# Altium schematic symbol library LM5148QRGYRQ1.SchLib: 1 symbol
Pins are listed as number, name and electrical type; pins without a type are passive.

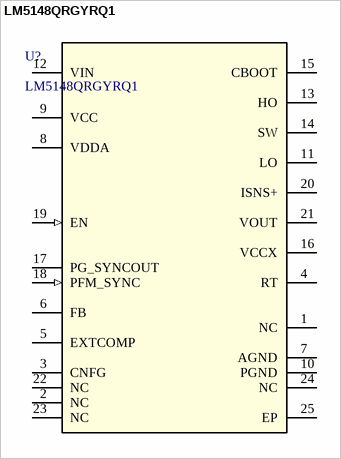
[diagram p0: symbol LM5148QRGYRQ1]

## LM5148QRGYRQ1
designator U?
Automotive, 80V synchronous buck DC/DC controller with ultra-low I<sub>Q</sub> 24-VQFN -40 to 125; Manufacturer_Name: Texas Instruments; TYPE: TYPE; RefDes: RefDes; Copyright: Copyright (C) 2025 Ultra Librarian. All rights reserved.; Manufacturer_Part_Number: LM5148QRGYRQ1
footprint RGY0024E-MFG
pins: 1 NC, 2 NC, 3 CNFG, 4 RT, 5 EXTCOMP, 6 FB, 7 AGND (power), 8 VDDA, 9 VCC (power), 10 PGND (power), 11 LO, 12 VIN (power), 13 HO, 14 SW (power), 15 CBOOT (power), 16 VCCX (power), 17 PG_SYNCOUT (oc), 18 PFM_SYNC (in), 19 EN (in), 20 ISNS+, 21 VOUT, 22 NC, 23 NC, 24 NC, 25 EP